# Altium footprint library FootPrintLib_11.PcbLib: 376 footprints (part 22 of 24)
Each footprint in its own frame and in the unit in brackets; x right, y up, seen from the top. Pads: shape width x height; smd on the part's side, far side on the other; paste and mask are expansions set on the pad; w line width, h text height; cw(c..) or ccw(c..) is an arc to the next point about the centre after c.
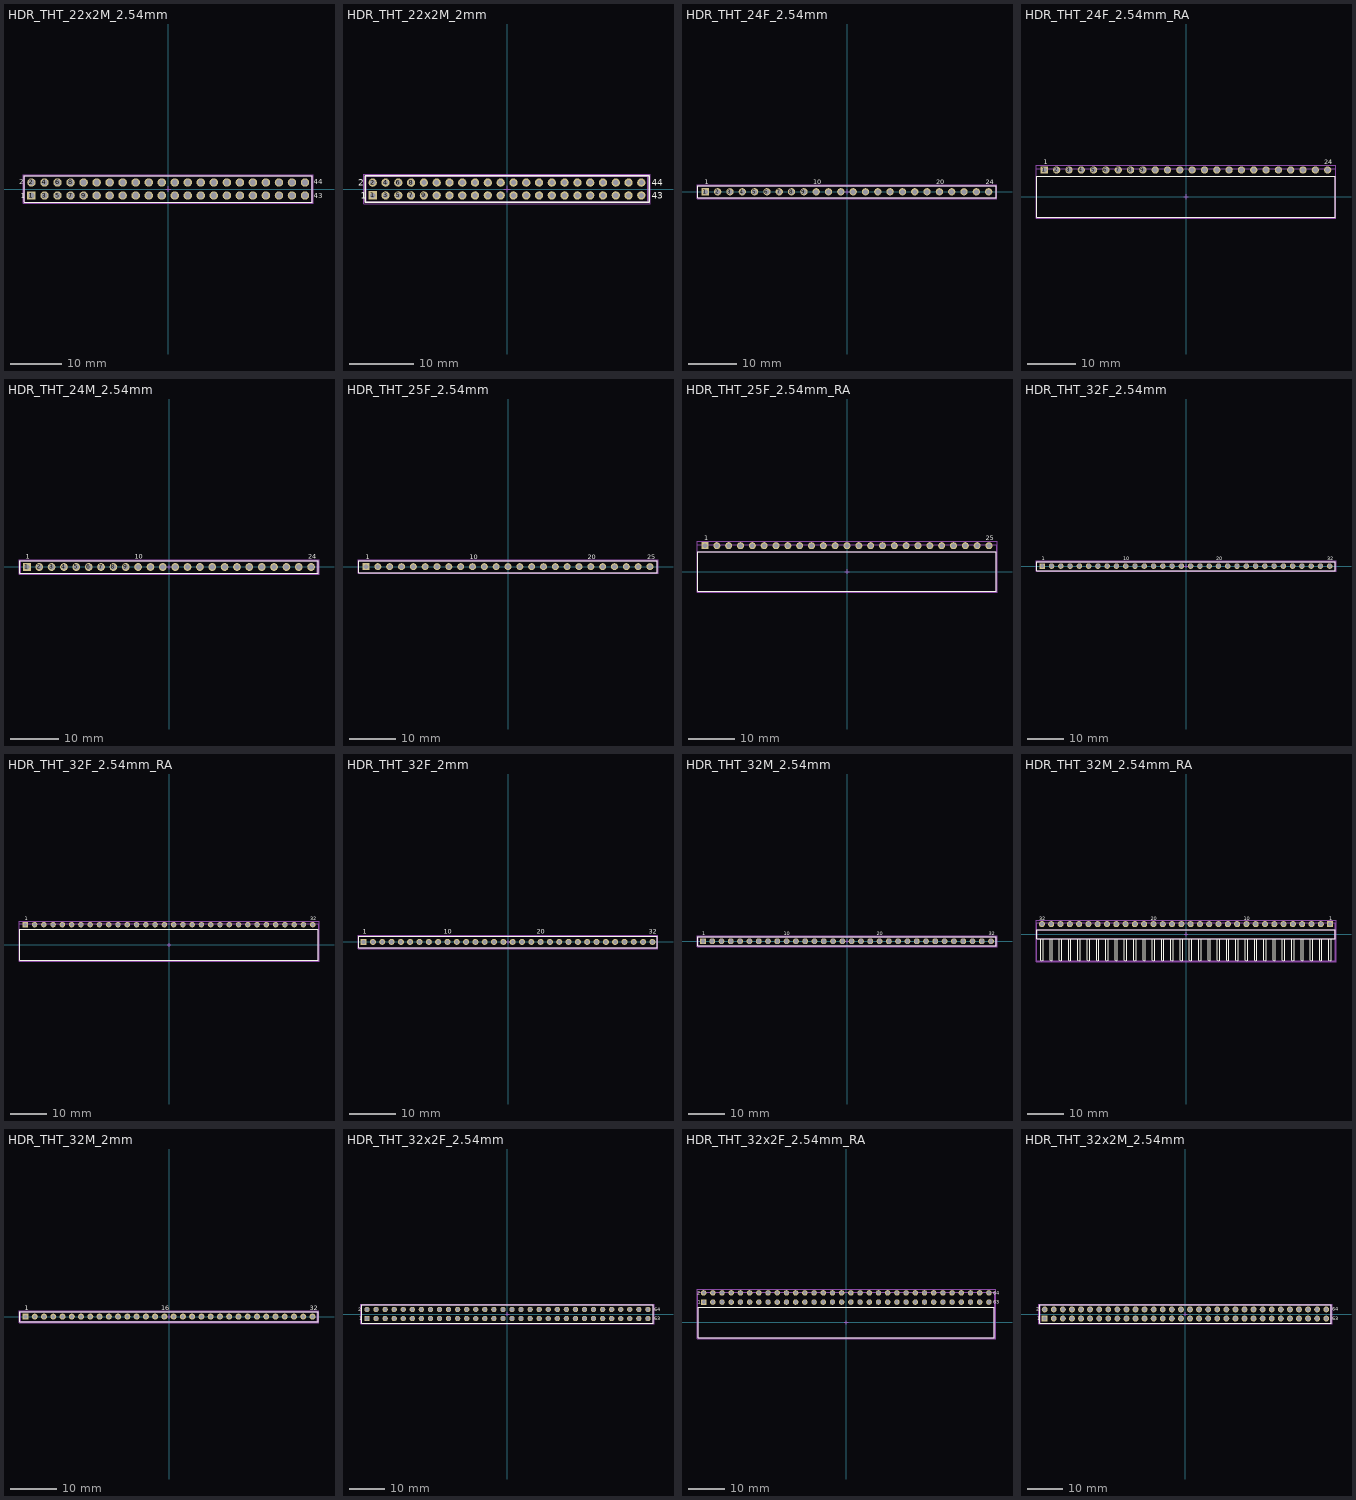
[diagram p21: the footprints below, top view; thin cyan lines are the x and y axes]

## HDR_THT_22x2M_2.54mm [mm] "Pin Header, pitch 2.54 mm, THT, Vertical, dual row, 44p"
height 8.54
pads (44):
  rect 1.65x1.65 hole 1.1: 1(-26.67,-1.27)
  round 1.65 hole 1.1: 2(-26.67,1.27) 3(-24.13,-1.27) 4(-24.13,1.27) 5(-21.59,-1.27) 6(-21.59,1.27) 7(-19.05,-1.27) 8(-19.05,1.27) 9(-16.51,-1.27) 10(-16.51,1.27) 11(-13.97,-1.27) 12(-13.97,1.27) 13(-11.43,-1.27) 14(-11.43,1.27) 15(-8.89,-1.27) 16(-8.89,1.27) 17(-6.35,-1.27) 18(-6.35,1.27) 19(-3.81,-1.27) 20(-3.81,1.27) 21(-1.27,-1.27) 22(-1.27,1.27) 23(1.27,-1.27) 24(1.27,1.27) 25(3.81,-1.27) 26(3.81,1.27) 27(6.35,-1.27) 28(6.35,1.27) 29(8.89,-1.27) 30(8.89,1.27) 31(11.43,-1.27) 32(11.43,1.27) 33(13.97,-1.27) 34(13.97,1.27) 35(16.51,-1.27) 36(16.51,1.27) 37(19.05,-1.27) 38(19.05,1.27) 39(21.59,-1.27) 40(21.59,1.27) 41(24.13,-1.27) 42(24.13,1.27) 43(26.67,-1.27) 44(26.67,1.27)
Top Overlay:
  lines w0.2: -28.09,-2.54 28.09,-2.54 28.09,2.54 -28.09,2.54 -28.09,-2.54
  text "1" at -28.8,-1.8 h1
  text "2" at -29.1,0.9 h1
  text "43" at 28.4,-1.8 h1
  text "44" at 28.4,0.9 h1
Mechanical 11:
  lines w0.1: -27.94,-2.54 27.94,-2.54 27.94,2.54 -27.94,2.54 -27.94,-2.54
Mechanical 13:
  lines w0.1: -28.09,-2.54 28.09,-2.54 28.09,2.54 -28.09,2.54 -28.09,-2.54
Mechanical 15:
  lines w0.1: -0.5,0 0.5,0 ; 0,-0.5 0,0.5 ; -28.29,-2.74 28.29,-2.74 28.29,2.74 -28.29,2.74 -28.29,-2.74
3D body "61304421121.stp": height 8.59, standoff -2.95, extent -27.94,-2.54 27.94,2.54

## HDR_THT_22x2M_2mm [mm] "2.00 mm THT Dual Pin Header, 44p"
height 6
pads (44):
  rect 1.3x1.3 hole 0.8: 1(-21,-1)
  round 1.3 hole 0.8: 2(-21,1) 3(-19,-1) 4(-19,1) 5(-17,-1) 6(-17,1) 7(-15,-1) 8(-15,1) 9(-13,-1) 10(-13,1) 11(-11,-1) 12(-11,1) 13(-9,-1) 14(-9,1) 15(-7,-1) 16(-7,1) 17(-5,-1) 18(-5,1) 19(-3,-1) 20(-3,1) 21(-1,-1) 22(-1,1) 23(1,-1) 24(1,1) 25(3,-1) 26(3,1) 27(5,-1) 28(5,1) 29(7,-1) 30(7,1) 31(9,-1) 32(9,1) 33(11,-1) 34(11,1) 35(13,-1) 36(13,1) 37(15,-1) 38(15,1) 39(17,-1) 40(17,1) 41(19,-1) 42(19,1) 43(21,-1) 44(21,1)
Top Overlay:
  lines w0.2: -22.2,-2.075 -22.2,2.075 22.2,2.075 22.2,-2.075 -22.2,-2.075
  text "1" at -22.9,-1.5 h1
  text "2" at -23.3,0.5 h1
  text "43" at 22.6,-1.5 h1
  text "44" at 22.6,0.5 h1
Mechanical 11:
  lines w0.1: -22,-2 -22,2 22,2 22,-2 -22,-2
Mechanical 13:
  lines w0.1: -22.2,-2.075 -22.2,2.075 22.2,2.075 22.2,-2.075 -22.2,-2.075
Mechanical 15:
  lines w0.1: -0.5,0 0.5,0 ; 0,-0.5 0,0.5 ; -22.4,-2.275 -22.4,2.275 22.4,2.275 22.4,-2.275 -22.4,-2.275
3D body "62004421121.stp": height 6.05, standoff -2.65, extent -22,-2 22,2

## HDR_THT_24F_2.54mm [mm] "Socket Header, Pitch 2.54 mm, THT, Vertical, single row, 24p"
height 8.5
pads (24):
  rect 1.5x1.5 hole 1.02: 1(-29.21,0)
  round 1.5 hole 1.02: 2(-26.67,0) 3(-24.13,0) 4(-21.59,0) 5(-19.05,0) 6(-16.51,0) 7(-13.97,0) 8(-11.43,0) 9(-8.89,0) 10(-6.35,0) 11(-3.81,0) 12(-1.27,0) 13(1.27,0) 14(3.81,0) 15(6.35,0) 16(8.89,0) 17(11.43,0) 18(13.97,0) 19(16.51,0) 20(19.05,0) 21(21.59,0) 22(24.13,0) 23(26.67,0) 24(29.21,0)
Top Overlay:
  lines w0.2: -30.73,-1.25 30.73,-1.25 30.73,1.25 -30.73,1.25 -30.73,-1.25
  text "24" at 28.58,1.6 h1
  text "10" at -6.98,1.6 h1
  text "1" at -29.3,1.6 h1
  text "20" at 18.42,1.6 h1
Mechanical 11:
  lines w0.1: -30.73,-1.25 30.73,-1.25 30.73,1.25 -30.73,1.25 -30.73,-1.25
Mechanical 13:
  lines w0.1: -30.855,-1.25 -30.855,1.25 30.855,1.25 30.855,-1.25 -30.855,-1.25
Mechanical 15:
  lines w0.1: -0.5,0 0.5,0 ; 0,-0.5 0,0.5 ; -30.93,-1.45 -30.93,1.45 30.93,1.45 30.93,-1.45 -30.93,-1.45
3D body "61302411821.stp": height 8.55, standoff -3.06, extent -30.73,-1.25 30.73,1.25

## HDR_THT_24F_2.54mm_RA [mm] "Socket Header, Pitch 2.54 mm, THT, Angled, single row, 24p"
height 2.5
pads (24):
  rect 1.5x1.5 hole 1.02: 1(-29.21,5.55)
  round 1.5 hole 1.02: 2(-26.67,5.55) 3(-24.13,5.55) 4(-21.59,5.55) 5(-19.05,5.55) 6(-16.51,5.55) 7(-13.97,5.55) 8(-11.43,5.55) 9(-8.89,5.55) 10(-6.35,5.55) 11(-3.81,5.55) 12(-1.27,5.55) 13(1.27,5.55) 14(3.81,5.55) 15(6.35,5.55) 16(8.89,5.55) 17(11.43,5.55) 18(13.97,5.55) 19(16.51,5.55) 20(19.05,5.55) 21(21.59,5.55) 22(24.13,5.55) 23(26.67,5.55) 24(29.21,5.55)
Top Overlay:
  lines w0.2: -30.73,-4.25 30.73,-4.25 30.73,4.25 -30.73,4.25 -30.73,-4.25
  text "24" at 28.47,6.7 h1
  text "1" at -29.37,6.7 h1
Mechanical 11:
  lines w0.1: -30.73,-4.25 -30.73,4.25 30.73,4.25 30.73,-4.25 -30.73,-4.25
Mechanical 13:
  lines w0.1: -30.855,-4.25 30.855,-4.25 30.855,5.75 -30.855,5.75 -30.855,-4.25
Mechanical 15:
  lines w0.1: -0.5,0 0.5,0 ; 0,-0.5 0,0.5 ; -30.93,-4.45 30.93,-4.45 30.93,6.5 -30.93,6.5 -30.93,-4.45
3D body "613024143121.stp": height 2.55, standoff -3.04, extent -30.73,-4.25 30.73,5.75

## HDR_THT_24M_2.54mm [mm] "Pin Header, pitch 2.54 mm, THT, Vertical, single row, 24p"
height 8.54
pads (24):
  rect 1.6x1.6 hole 1.1: 1(-29.21,0)
  round 1.6 hole 1.1: 2(-26.67,0) 3(-24.13,0) 4(-21.59,0) 5(-19.05,0) 6(-16.51,0) 7(-13.97,0) 8(-11.43,0) 9(-8.89,0) 10(-6.35,0) 11(-3.81,0) 12(-1.27,0) 13(1.27,0) 14(3.81,0) 15(6.35,0) 16(8.89,0) 17(11.43,0) 18(13.97,0) 19(16.51,0) 20(19.05,0) 21(21.59,0) 22(24.13,0) 23(26.67,0) 24(29.21,0)
Top Overlay:
  lines w0.2: -30.63,-1.27 -30.63,1.27 30.63,1.27 30.63,-1.27 -30.63,-1.27
  text "1" at -29.4,1.7 h1
  text "10" at -7.06,1.7 h1
  text "24" at 28.58,1.7 h1
Mechanical 11:
  lines w0.1: -30.48,-1.27 30.48,-1.27 30.48,1.27 -30.48,1.27 -30.48,-1.27
Mechanical 13:
  lines w0.1: -30.63,-1.27 -30.63,1.27 30.63,1.27 30.63,-1.27 -30.63,-1.27
Mechanical 15:
  lines w0.1: -0.5,0 0.5,0 ; 0,-0.5 0,0.5 ; -30.83,-1.47 -30.83,1.47 30.83,1.47 30.83,-1.47 -30.83,-1.47
3D body "61302411121.stp": height 8.57, standoff -2.97, extent -30.48,-1.27 30.48,1.27

## HDR_THT_25F_2.54mm [mm] "Socket Header, Pitch 2.54 mm, THT, Vertical, single row, 25p"
height 8.5
pads (25):
  rect 1.5x1.5 hole 1.02: 1(-30.48,0)
  round 1.5 hole 1.02: 2(-27.94,0) 3(-25.4,0) 4(-22.86,0) 5(-20.32,0) 6(-17.78,0) 7(-15.24,0) 8(-12.7,0) 9(-10.16,0) 10(-7.62,0) 11(-5.08,0) 12(-2.54,0) 13(0,0) 14(2.54,0) 15(5.08,0) 16(7.62,0) 17(10.16,0) 18(12.7,0) 19(15.24,0) 20(17.78,0) 21(20.32,0) 22(22.86,0) 23(25.4,0) 24(27.94,0) 25(30.48,0)
Top Overlay:
  lines w0.2: -32,-1.25 32,-1.25 32,1.25 -32,1.25 -32,-1.25
  text "25" at 29.85,1.6 h1
  text "10" at -8.25,1.6 h1
  text "1" at -30.57,1.6 h1
  text "20" at 17.15,1.6 h1
Mechanical 11:
  lines w0.1: -32,-1.25 32,-1.25 32,1.25 -32,1.25 -32,-1.25
Mechanical 13:
  lines w0.1: -32.125,-1.25 -32.125,1.25 32.125,1.25 32.125,-1.25 -32.125,-1.25
Mechanical 15:
  lines w0.1: -0.5,0 0.5,0 ; 0,-0.5 0,0.5 ; -32.2,-1.45 -32.2,1.45 32.2,1.45 32.2,-1.45 -32.2,-1.45
3D body "61302511821.stp": height 8.55, standoff -3.06, extent -32,-1.25 32,1.25

## HDR_THT_25F_2.54mm_RA [mm] "Socket Header, Pitch 2.54 mm, THT, Angled, single row, 25p"
height 2.5
pads (25):
  rect 1.5x1.5 hole 1.02: 1(-30.48,5.55)
  round 1.5 hole 1.02: 2(-27.94,5.55) 3(-25.4,5.55) 4(-22.86,5.55) 5(-20.32,5.55) 6(-17.78,5.55) 7(-15.24,5.55) 8(-12.7,5.55) 9(-10.16,5.55) 10(-7.62,5.55) 11(-5.08,5.55) 12(-2.54,5.55) 13(0,5.55) 14(2.54,5.55) 15(5.08,5.55) 16(7.62,5.55) 17(10.16,5.55) 18(12.7,5.55) 19(15.24,5.55) 20(17.78,5.55) 21(20.32,5.55) 22(22.86,5.55) 23(25.4,5.55) 24(27.94,5.55) 25(30.48,5.55)
Top Overlay:
  lines w0.2: -32,-4.25 -32,4.25 32,4.25 32,-4.25 -32,-4.25
  text "1" at -30.64,6.7 h1
  text "25" at 29.74,6.7 h1
Mechanical 11:
  lines w0.1: -32,-4.25 32,-4.25 32,4.25 -32,4.25 -32,-4.25
Mechanical 13:
  lines w0.1: -32.125,-4.25 -32.125,5.75 32.125,5.75 32.125,-4.25 -32.125,-4.25
Mechanical 15:
  lines w0.1: -0.5,0 0.5,0 ; 0,-0.5 0,0.5 ; -32.2,-4.45 -32.2,6.5 32.2,6.5 32.2,-4.45 -32.2,-4.45
3D body "613025143121.stp": height 2.55, standoff -3.04, extent -32,-4.25 32,5.75

## HDR_THT_32F_2.54mm [mm] "Socket Header, Pitch 2.54 mm, THT, Vertical, single row, 32p"
height 8.5
pads (32):
  rect 1.5x1.5 hole 1.02: 1(-39.37,0)
  round 1.5 hole 1.02: 2(-36.83,0) 3(-34.29,0) 4(-31.75,0) 5(-29.21,0) 6(-26.67,0) 7(-24.13,0) 8(-21.59,0) 9(-19.05,0) 10(-16.51,0) 11(-13.97,0) 12(-11.43,0) 13(-8.89,0) 14(-6.35,0) 15(-3.81,0) 16(-1.27,0) 17(1.27,0) 18(3.81,0) 19(6.35,0) 20(8.89,0) 21(11.43,0) 22(13.97,0) 23(16.51,0) 24(19.05,0) 25(21.59,0) 26(24.13,0) 27(26.67,0) 28(29.21,0) 29(31.75,0) 30(34.29,0) 31(36.83,0) 32(39.37,0)
Top Overlay:
  lines w0.2: -40.89,-1.25 40.89,-1.25 40.89,1.25 -40.89,1.25 -40.89,-1.25
  text "20" at 8.26,1.6 h1
  text "32" at 38.74,1.6 h1
  text "10" at -17.14,1.6 h1
  text "1" at -39.46,1.6 h1
Mechanical 11:
  lines w0.1: -40.89,-1.25 40.89,-1.25 40.89,1.25 -40.89,1.25 -40.89,-1.25
Mechanical 13:
  lines w0.1: -41.015,-1.25 -41.015,1.25 41.015,1.25 41.015,-1.25 -41.015,-1.25
Mechanical 15:
  lines w0.1: -0.5,0 0.5,0 ; 0,-0.5 0,0.5 ; -41.09,-1.45 -41.09,1.45 41.09,1.45 41.09,-1.45 -41.09,-1.45
3D body "61303211821.stp": height 8.55, standoff -3.06, extent -40.89,-1.25 40.89,1.25

## HDR_THT_32F_2.54mm_RA [mm] "Socket Header, Pitch 2.54 mm, THT, Angled, single row, 32p"
height 2.5
pads (32):
  rect 1.5x1.5 hole 1.02: 1(-39.37,5.55)
  round 1.5 hole 1.02: 2(-36.83,5.55) 3(-34.29,5.55) 4(-31.75,5.55) 5(-29.21,5.55) 6(-26.67,5.55) 7(-24.13,5.55) 8(-21.59,5.55) 9(-19.05,5.55) 10(-16.51,5.55) 11(-13.97,5.55) 12(-11.43,5.55) 13(-8.89,5.55) 14(-6.35,5.55) 15(-3.81,5.55) 16(-1.27,5.55) 17(1.27,5.55) 18(3.81,5.55) 19(6.35,5.55) 20(8.89,5.55) 21(11.43,5.55) 22(13.97,5.55) 23(16.51,5.55) 24(19.05,5.55) 25(21.59,5.55) 26(24.13,5.55) 27(26.67,5.55) 28(29.21,5.55) 29(31.75,5.55) 30(34.29,5.55) 31(36.83,5.55) 32(39.37,5.55)
Top Overlay:
  lines w0.2: -40.89,-4.25 40.89,-4.25 40.89,4.25 -40.89,4.25 -40.89,-4.25
  text "1" at -39.53,6.7 h1
  text "32" at 38.63,6.7 h1
Mechanical 11:
  lines w0.1: -40.89,-4.25 -40.89,4.25 40.89,4.25 40.89,-4.25 -40.89,-4.25
Mechanical 13:
  lines w0.1: -41.015,-4.25 41.015,-4.25 41.015,5.75 -41.015,5.75 -41.015,-4.25
Mechanical 15:
  lines w0.1: -0.5,0 0.5,0 ; 0,-0.5 0,0.5 ; -41.09,-4.45 41.09,-4.45 41.09,6.5 -41.09,6.5 -41.09,-4.45
3D body "613032143121.stp": height 2.55, standoff -3.04, extent -40.89,-4.25 40.89,5.75

## HDR_THT_32F_2mm [mm] "Socket Header, Pitch 2.00 mm, THT, Vertical, single row, 32p"
height 4.45
pads (32):
  rect 1.3x1.3 hole 0.8: 1(-31,0)
  round 1.3 hole 0.8: 2(-29,0) 3(-27,0) 4(-25,0) 5(-23,0) 6(-21,0) 7(-19,0) 8(-17,0) 9(-15,0) 10(-13,0) 11(-11,0) 12(-9,0) 13(-7,0) 14(-5,0) 15(-3,0) 16(-1,0) 17(1,0) 18(3,0) 19(5,0) 20(7,0) 21(9,0) 22(11,0) 23(13,0) 24(15,0) 25(17,0) 26(19,0) 27(21,0) 28(23,0) 29(25,0) 30(27,0) 31(29,0) 32(31,0)
Top Overlay:
  lines w0.2: -32,-1.25 -32,1.25 32,1.25 32,-1.25 -32,-1.25
  text "10" at -13.8,1.7 h1
  text "1" at -31.2,1.7 h1
  text "20" at 6.2,1.7 h1
  text "32" at 30.2,1.7 h1
Mechanical 11:
  lines w0.1: -32,-1.25 -32,1.25 32,1.25 32,-1.25 -32,-1.25
Mechanical 13:
  lines w0.1: -32.15,-1.325 -32.15,1.325 32.15,1.325 32.15,-1.325 -32.15,-1.325
Mechanical 15:
  lines w0.1: -0.5,0 0.5,0 ; 0,-0.5 0,0.5 ; -32.2,-1.45 -32.2,1.45 32.2,1.45 32.2,-1.45 -32.2,-1.45
3D body "62003211821.stp": height 4.35, standoff -2.65, extent -32.25,-1.25 32.25,1.25

## HDR_THT_32M_2.54mm [mm] "Pin Header, pitch 2.54 mm, THT, Vertical, single row, 32p"
height 8.54
pads (32):
  rect 1.6x1.6 hole 1.1: 1(-39.37,0)
  round 1.6 hole 1.1: 2(-36.83,0) 3(-34.29,0) 4(-31.75,0) 5(-29.21,0) 6(-26.67,0) 7(-24.13,0) 8(-21.59,0) 9(-19.05,0) 10(-16.51,0) 11(-13.97,0) 12(-11.43,0) 13(-8.89,0) 14(-6.35,0) 15(-3.81,0) 16(-1.27,0) 17(1.27,0) 18(3.81,0) 19(6.35,0) 20(8.89,0) 21(11.43,0) 22(13.97,0) 23(16.51,0) 24(19.05,0) 25(21.59,0) 26(24.13,0) 27(26.67,0) 28(29.21,0) 29(31.75,0) 30(34.29,0) 31(36.83,0) 32(39.37,0)
Top Overlay:
  lines w0.2: -40.79,-1.27 40.79,-1.27 40.79,1.27 -40.79,1.27 -40.79,-1.27
  text "10" at -17.22,1.7 h1
  text "1" at -39.56,1.7 h1
  text "32" at 38.74,1.7 h1
  text "20" at 8.18,1.7 h1
Mechanical 11:
  lines w0.1: -40.64,-1.27 -40.64,1.27 40.64,1.27 40.64,-1.27 -40.64,-1.27
Mechanical 13:
  lines w0.1: -40.79,-1.27 40.79,-1.27 40.79,1.27 -40.79,1.27 -40.79,-1.27
Mechanical 15:
  lines w0.1: -0.5,0 0.5,0 ; 0,-0.5 0,0.5 ; -40.99,-1.47 40.99,-1.47 40.99,1.47 -40.99,1.47 -40.99,-1.47
3D body "61303211121.stp": height 8.57, standoff -2.97, extent -40.64,-1.27 40.64,1.27

## HDR_THT_32M_2.54mm_RA [mm] "Pin Header, pitch 2.54 mm, THT, Angled, single row, 32p"
height 2.54
pads (32):
  rect 1.65x1.65 hole 1.1: 1(39.37,2.77)
  round 1.65 hole 1.1: 2(36.83,2.77) 3(34.29,2.77) 4(31.75,2.77) 5(29.21,2.77) 6(26.67,2.77) 7(24.13,2.77) 8(21.59,2.77) 9(19.05,2.77) 10(16.51,2.77) 11(13.97,2.77) 12(11.43,2.77) 13(8.89,2.77) 14(6.35,2.77) 15(3.81,2.77) 16(1.27,2.77) 17(-1.27,2.77) 18(-3.81,2.77) 19(-6.35,2.77) 20(-8.89,2.77) 21(-11.43,2.77) 22(-13.97,2.77) 23(-16.51,2.77) 24(-19.05,2.77) 25(-21.59,2.77) 26(-24.13,2.77) 27(-26.67,2.77) 28(-29.21,2.77) 29(-31.75,2.77) 30(-34.29,2.77) 31(-36.83,2.77) 32(-39.37,2.77)
Top Overlay:
  lines w0.15: -39.69,-1.27 -39.69,-7.07 -39.37,-7.27 -39.05,-7.07 -39.05,-1.27 ; -37.15,-1.27 -37.15,-7.07 -36.83,-7.27 -36.51,-7.07 -36.51,-1.27 ; -34.61,-1.27 -34.61,-7.07 -34.29,-7.27 -33.97,-7.07 -33.97,-1.27 ; -32.07,-1.27 -32.07,-7.07 -31.75,-7.27 -31.43,-7.07 -31.43,-1.27 ; -29.53,-1.27 -29.53,-7.07 -29.21,-7.27 -28.89,-7.07 -28.89,-1.27 ; -26.99,-1.27 -26.99,-7.07 -26.67,-7.27 -26.35,-7.07 -26.35,-1.27 ; -24.45,-1.27 -24.45,-7.07 -24.13,-7.27 -23.81,-7.07 -23.81,-1.27 ; -21.91,-1.27 -21.91,-7.07 -21.59,-7.27 -21.27,-7.07 -21.27,-1.27 ; -19.37,-1.27 -19.37,-7.07 -19.05,-7.27 -18.73,-7.07 -18.73,-1.27 ; -16.83,-1.27 -16.83,-7.07 -16.51,-7.27 -16.19,-7.07 -16.19,-1.27 ; -14.29,-1.27 -14.29,-7.07 -13.97,-7.27 -13.65,-7.07 -13.65,-1.27 ; -11.75,-1.27 -11.75,-7.07 -11.43,-7.27 -11.11,-7.07 -11.11,-1.27 ; -9.21,-1.27 -9.21,-7.07 -8.89,-7.27 -8.57,-7.07 -8.57,-1.27 ; -6.67,-1.27 -6.67,-7.07 -6.35,-7.27 -6.03,-7.07 -6.03,-1.27 ; -4.13,-1.27 -4.13,-7.07 -3.81,-7.27 -3.49,-7.07 -3.49,-1.27 ; -1.59,-1.27 -1.59,-7.07 -1.27,-7.27 -0.95,-7.07 -0.95,-1.27 ; 0.95,-1.27 0.95,-7.07 1.27,-7.27 1.59,-7.07 1.59,-1.27 ; 3.49,-1.27 3.49,-7.07 3.81,-7.27 4.13,-7.07 4.13,-1.27 ; 6.03,-1.27 6.03,-7.07 6.35,-7.27 6.67,-7.07 6.67,-1.27 ; 8.57,-1.27 8.57,-7.07 8.89,-7.27 9.21,-7.07 9.21,-1.27 ; 11.11,-1.27 11.11,-7.07 11.43,-7.27 11.75,-7.07 11.75,-1.27 ; 13.65,-1.27 13.65,-7.07 13.97,-7.27 14.29,-7.07 14.29,-1.27 ; 16.19,-1.27 16.19,-7.07 16.51,-7.27 16.83,-7.07 16.83,-1.27 ; 18.73,-1.27 18.73,-7.07 19.05,-7.27 19.37,-7.07 19.37,-1.27 ; 21.27,-1.27 21.27,-7.07 21.59,-7.27 21.91,-7.07 21.91,-1.27 ; 23.81,-1.27 23.81,-7.07 24.13,-7.27 24.45,-7.07 24.45,-1.27 ; 26.35,-1.27 26.35,-7.07 26.67,-7.27 26.99,-7.07 26.99,-1.27 ; 28.89,-1.27 28.89,-7.07 29.21,-7.27 29.53,-7.07 29.53,-1.27 ; 31.43,-1.27 31.43,-7.07 31.75,-7.27 32.07,-7.07 32.07,-1.27 ; 33.97,-1.27 33.97,-7.07 34.29,-7.27 34.61,-7.07 34.61,-1.27 ; 36.51,-1.27 36.51,-7.07 36.83,-7.27 37.15,-7.07 37.15,-1.27 ; 39.05,-1.27 39.05,-7.07 39.37,-7.27 39.69,-7.07 39.69,-1.27
  lines w0.2: -40.79,-1.27 40.79,-1.27 40.79,1.27 -40.79,1.27 -40.79,-1.27
  text "10" at 15.74,3.9 h1
  text "1" at 39.2,3.9 h1
  text "20" at -9.66,3.9 h1
  text "32" at -40.14,3.9 h1
Mechanical 11:
  lines w0.1: -40.64,-1.27 40.64,-1.27 40.64,1.27 -40.64,1.27 -40.64,-1.27
Mechanical 13:
  lines w0.1: -40.79,-7.27 40.79,-7.27 40.79,3.09 -40.79,3.09 -40.79,-7.27
Mechanical 15:
  lines w0.1: -0.5,0 0.5,0 ; 0,-0.5 0,0.5 ; -40.99,-7.47 -40.99,3.795 40.99,3.795 40.99,-7.47 -40.99,-7.47
3D body "61303211021.stp": height 2.62, standoff -2.92, extent -40.64,-7.27 40.64,3.09

## HDR_THT_32M_2mm [mm] "Pin Header, pitch 2.00 mm, THT, Vertical, single row, 32p"
height 6.35
pads (32):
  rect 1.3x1.3 hole 0.8: 1(-31,0)
  round 1.3 hole 0.8: 2(-29,0) 3(-27,0) 4(-25,0) 5(-23,0) 6(-21,0) 7(-19,0) 8(-17,0) 9(-15,0) 10(-13,0) 11(-11,0) 12(-9,0) 13(-7,0) 14(-5,0) 15(-3,0) 16(-1,0) 17(1,0) 18(3,0) 19(5,0) 20(7,0) 21(9,0) 22(11,0) 23(13,0) 24(15,0) 25(17,0) 26(19,0) 27(21,0) 28(23,0) 29(25,0) 30(27,0) 31(29,0) 32(31,0)
Top Overlay:
  lines w0.2: -32.2,-1.075 -32.2,1.075 32.2,1.075 32.2,-1.075 -32.2,-1.075
  text "1" at -31.2,1.4 h1
  text "32" at 30.4,1.4 h1
  text "16" at -1.65,1.4 h1
Mechanical 11:
  lines w0.1: -32,-1 -32,1 32,1 32,-1 -32,-1
Mechanical 13:
  lines w0.1: -32.2,-1.075 -32.2,1.075 32.2,1.075 32.2,-1.075 -32.2,-1.075
Mechanical 15:
  lines w0.1: -0.5,0 0.5,0 ; 0,-0.5 0,0.5 ; -32.4,-1.275 -32.4,1.275 32.4,1.275 32.4,-1.275 -32.4,-1.275
3D body "62003211121.stp": height 6.05, standoff -2.65, extent -32,-1 32,1

## HDR_THT_32x2F_2.54mm [mm] "Socket Header, Pitch 2.54 mm, THT, Vertical, dual row, 64p"
height 8.4
pads (64):
  rect 1.5x1.5 hole 1.02: 1(-39.37,-1.27)
  round 1.5 hole 1.02: 2(-39.37,1.27) 3(-36.83,-1.27) 4(-36.83,1.27) 5(-34.29,-1.27) 6(-34.29,1.27) 7(-31.75,-1.27) 8(-31.75,1.27) 9(-29.21,-1.27) 10(-29.21,1.27) 11(-26.67,-1.27) 12(-26.67,1.27) 13(-24.13,-1.27) 14(-24.13,1.27) 15(-21.59,-1.27) 16(-21.59,1.27) 17(-19.05,-1.27) 18(-19.05,1.27) 19(-16.51,-1.27) 20(-16.51,1.27) 21(-13.97,-1.27) 22(-13.97,1.27) 23(-11.43,-1.27) 24(-11.43,1.27) 25(-8.89,-1.27) 26(-8.89,1.27) 27(-6.35,-1.27) 28(-6.35,1.27) 29(-3.81,-1.27) 30(-3.81,1.27) 31(-1.27,-1.27) 32(-1.27,1.27) 33(1.27,-1.27) 34(1.27,1.27) 35(3.81,-1.27) 36(3.81,1.27) 37(6.35,-1.27) 38(6.35,1.27) 39(8.89,-1.27) 40(8.89,1.27) 41(11.43,-1.27) 42(11.43,1.27) 43(13.97,-1.27) 44(13.97,1.27) 45(16.51,-1.27) 46(16.51,1.27) 47(19.05,-1.27) 48(19.05,1.27) 49(21.59,-1.27) 50(21.59,1.27) 51(24.13,-1.27) 52(24.13,1.27) 53(26.67,-1.27) 54(26.67,1.27) 55(29.21,-1.27) 56(29.21,1.27) 57(31.75,-1.27) 58(31.75,1.27) 59(34.29,-1.27) 60(34.29,1.27) 61(36.83,-1.27) 62(36.83,1.27) 63(39.37,-1.27) 64(39.37,1.27)
Top Overlay:
  lines w0.2: -40.89,-2.54 40.89,-2.54 40.89,2.54 -40.89,2.54 -40.89,-2.54
  text "64" at 41.2,0.8 h1
  text "63" at 41.2,-1.8 h1
  text "1" at -41.6,-1.8 h1
  text "2" at -41.9,0.8 h1
Mechanical 11:
  lines w0.1: -40.89,-2.54 -40.89,2.54 40.89,2.54 40.89,-2.54 -40.89,-2.54
Mechanical 13:
  lines w0.1: -41.015,-2.54 41.015,-2.54 41.015,2.54 -41.015,2.54 -41.015,-2.54
Mechanical 15:
  lines w0.1: -0.5,0 0.5,0 ; 0,-0.5 0,0.5 ; -41.09,-2.74 41.09,-2.74 41.09,2.74 -41.09,2.74 -41.09,-2.74
3D body "61306421821.stp": height 8.45, standoff -3.05, extent -40.89,-2.54 40.89,2.54

## HDR_THT_32x2F_2.54mm_RA [mm] "Socket Header, Pitch 2.54 mm, THT, Angled, dual row, 64p"
height 5.08
pads (64):
  rect 1.5x1.5 hole 1.02: 1(-39.37,5.61)
  round 1.5 hole 1.02: 2(-39.37,8.15) 3(-36.83,5.61) 4(-36.83,8.15) 5(-34.29,5.61) 6(-34.29,8.15) 7(-31.75,5.61) 8(-31.75,8.15) 9(-29.21,5.61) 10(-29.21,8.15) 11(-26.67,5.61) 12(-26.67,8.15) 13(-24.13,5.61) 14(-24.13,8.15) 15(-21.59,5.61) 16(-21.59,8.15) 17(-19.05,5.61) 18(-19.05,8.15) 19(-16.51,5.61) 20(-16.51,8.15) 21(-13.97,5.61) 22(-13.97,8.15) 23(-11.43,5.61) 24(-11.43,8.15) 25(-8.89,5.61) 26(-8.89,8.15) 27(-6.35,5.61) 28(-6.35,8.15) 29(-3.81,5.61) 30(-3.81,8.15) 31(-1.27,5.61) 32(-1.27,8.15) 33(1.27,5.61) 34(1.27,8.15) 35(3.81,5.61) 36(3.81,8.15) 37(6.35,5.61) 38(6.35,8.15) 39(8.89,5.61) 40(8.89,8.15) 41(11.43,5.61) 42(11.43,8.15) 43(13.97,5.61) 44(13.97,8.15) 45(16.51,5.61) 46(16.51,8.15) 47(19.05,5.61) 48(19.05,8.15) 49(21.59,5.61) 50(21.59,8.15) 51(24.13,5.61) 52(24.13,8.15) 53(26.67,5.61) 54(26.67,8.15) 55(29.21,5.61) 56(29.21,8.15) 57(31.75,5.61) 58(31.75,8.15) 59(34.29,5.61) 60(34.29,8.15) 61(36.83,5.61) 62(36.83,8.15) 63(39.37,5.61) 64(39.37,8.15)
Top Overlay:
  lines w0.2: -40.89,-4.25 40.89,-4.25 40.89,4.25 -40.89,4.25 -40.89,-4.25
  text "1" at -41,5.1 h1
  text "2" at -41.2,7.6 h1
  text "63" at 40.6,5.1 h1
  text "64" at 40.6,7.6 h1
Mechanical 11:
  lines w0.1: -40.89,-4.25 -40.89,4.25 40.89,4.25 40.89,-4.25 -40.89,-4.25
Mechanical 13:
  lines w0.1: -41.04,-4.25 -41.04,8.35 41.04,8.35 41.04,-4.25 -41.04,-4.25
Mechanical 15:
  lines w0.1: -0.5,0 0.5,0 ; 0,-0.5 0,0.5 ; -41.09,-4.45 -41.09,9.1 41.19,9.1 41.19,-4.45 -41.09,-4.45
3D body "613064243121.stp": height 5.05, standoff -3.25, extent -40.89,-4.25 40.89,8.35

## HDR_THT_32x2M_2.54mm [mm] "Pin Header, pitch 2.54 mm, THT, Vertical, dual row, 64p"
height 8.54
pads (64):
  rect 1.65x1.65 hole 1.1: 1(-39.37,-1.27)
  round 1.65 hole 1.1: 2(-39.37,1.27) 3(-36.83,-1.27) 4(-36.83,1.27) 5(-34.29,-1.27) 6(-34.29,1.27) 7(-31.75,-1.27) 8(-31.75,1.27) 9(-29.21,-1.27) 10(-29.21,1.27) 11(-26.67,-1.27) 12(-26.67,1.27) 13(-24.13,-1.27) 14(-24.13,1.27) 15(-21.59,-1.27) 16(-21.59,1.27) 17(-19.05,-1.27) 18(-19.05,1.27) 19(-16.51,-1.27) 20(-16.51,1.27) 21(-13.97,-1.27) 22(-13.97,1.27) 23(-11.43,-1.27) 24(-11.43,1.27) 25(-8.89,-1.27) 26(-8.89,1.27) 27(-6.35,-1.27) 28(-6.35,1.27) 29(-3.81,-1.27) 30(-3.81,1.27) 31(-1.27,-1.27) 32(-1.27,1.27) 33(1.27,-1.27) 34(1.27,1.27) 35(3.81,-1.27) 36(3.81,1.27) 37(6.35,-1.27) 38(6.35,1.27) 39(8.89,-1.27) 40(8.89,1.27) 41(11.43,-1.27) 42(11.43,1.27) 43(13.97,-1.27) 44(13.97,1.27) 45(16.51,-1.27) 46(16.51,1.27) 47(19.05,-1.27) 48(19.05,1.27) 49(21.59,-1.27) 50(21.59,1.27) 51(24.13,-1.27) 52(24.13,1.27) 53(26.67,-1.27) 54(26.67,1.27) 55(29.21,-1.27) 56(29.21,1.27) 57(31.75,-1.27) 58(31.75,1.27) 59(34.29,-1.27) 60(34.29,1.27) 61(36.83,-1.27) 62(36.83,1.27) 63(39.37,-1.27) 64(39.37,1.27)
Top Overlay:
  lines w0.2: -40.79,-2.54 40.79,-2.54 40.79,2.54 -40.79,2.54 -40.79,-2.54
  text "1" at -41.5,-1.8 h1
  text "2" at -41.8,0.9 h1
  text "63" at 41.1,-1.8 h1
  text "64" at 41.1,0.9 h1
Mechanical 11:
  lines w0.1: -40.64,-2.54 40.64,-2.54 40.64,2.54 -40.64,2.54 -40.64,-2.54
Mechanical 13:
  lines w0.1: -40.79,-2.54 40.79,-2.54 40.79,2.54 -40.79,2.54 -40.79,-2.54
Mechanical 15:
  lines w0.1: -0.5,0 0.5,0 ; 0,-0.5 0,0.5 ; -40.99,-2.74 40.99,-2.74 40.99,2.74 -40.99,2.74 -40.99,-2.74
3D body "61306421121.stp": height 8.59, standoff -2.95, extent -40.64,-2.54 40.64,2.54